# EAGLE library part ADF4350BCPZ-RL7 (library ADF4350BCPZ-RL7)
Wideband Synthesizer with Integrated VCO Source: Datasheet <http://componentsearchengine.com/Datasheets/1/ADF4350BCPZ-RL7.pdf>
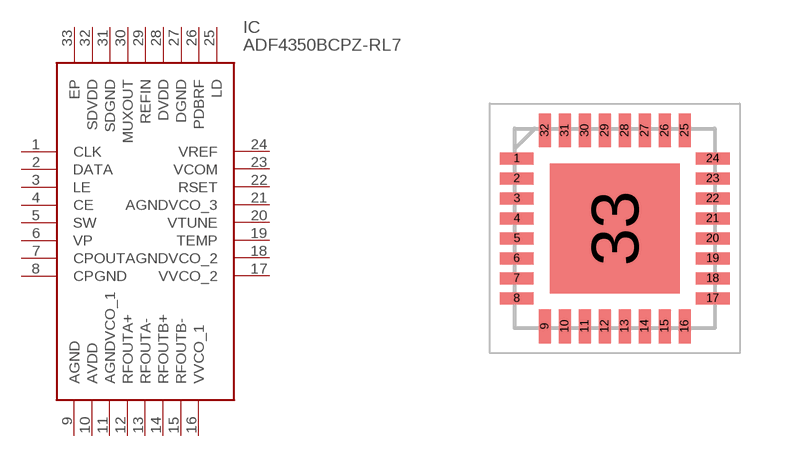
[diagram p0: symbol with the pads of QFN50P500X500X100-33N; footprint QFN50P500X500X100-33N]

Designator prefix IC

## ADF4350BCPZ-RL7 (Description: Wideband Synthesizer with Integrated VCO; Height: 1mm; Manufacturer_Name: Analog Devices; Manufacturer_Part_Number: ADF4350BCPZ-RL7; Mouser_Part_Number: 584-ADF4350BCPZ-R7; Mouser_Price-Stock: https://www.mouser.co.uk/ProductDetail/Analog-Devices/ADF4350BCPZ-RL7?qs=BpaRKvA4VqHLeFsdtKy2aw%3D%3D)  [QFN50P500X500X100-33N]
1  CLK
2  DATA
3  LE
4  CE
5  SW
6  VP
7  CPOUT
8  CPGND
9  AGND
10  AVDD
11  AGNDVCO_1
12  RFOUTA+
13  RFOUTA-
14  RFOUTB+
15  RFOUTB-
16  VVCO_1
17  VVCO_2
18  AGNDVCO_2
19  TEMP
20  VTUNE
21  AGNDVCO_3
22  RSET
23  VCOM
24  VREF
25  LD
26  PDBRF
27  DGND
28  DVDD
29  REFIN
30  MUXOUT
31  SDGND
32  SDVDD
33  EP

## Footprint QFN50P500X500X100-33N (pad centres in mm)
32-LEAD [LFCSP_VQ]
smd 0.85 x 0.3: 1 -2.45,1.75; 2 -2.45,1.25; 3 -2.45,0.75; 4 -2.45,0.25; 5 -2.45,-0.25; 6 -2.45,-0.75; 7 -2.45,-1.25; 8 -2.45,-1.75; 17 2.45,-1.75; 18 2.45,-1.25; 19 2.45,-0.75; 20 2.45,-0.25; 21 2.45,0.25; 22 2.45,0.75; 23 2.45,1.25; 24 2.45,1.75
smd 0.3 x 0.85: 9 -1.75,-2.45; 10 -1.25,-2.45; 11 -0.75,-2.45; 12 -0.25,-2.45; 13 0.25,-2.45; 14 0.75,-2.45; 15 1.25,-2.45; 16 1.75,-2.45; 25 1.75,2.45; 26 1.25,2.45; 27 0.75,2.45; 28 0.25,2.45; 29 -0.25,2.45; 30 -0.75,2.45; 31 -1.25,2.45; 32 -1.75,2.45
smd 3.25 x 3.25: 33 0,0